# Altium integrated library ECEN5730Lib_2023_05_DS.IntLib: 125 symbols
Pins are listed as number, name and electrical type; pins without a type are passive.

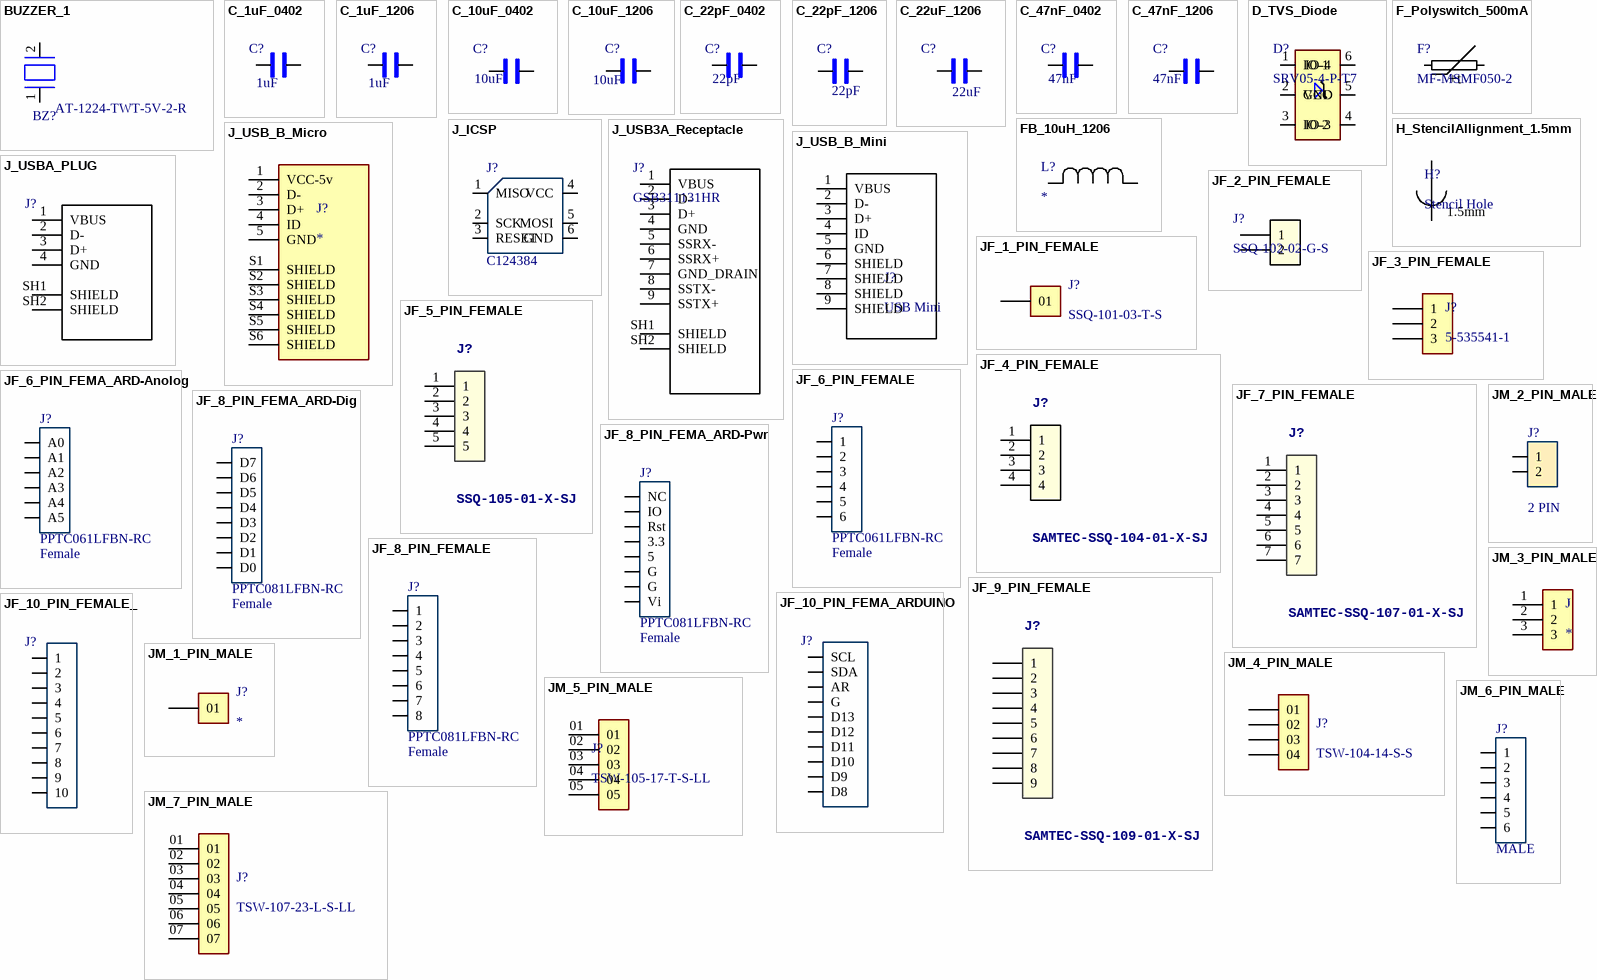
[diagram p0: symbols BUZZER_1 to JM_7_PIN_MALE]

## BUZZER_1
designator BZ?, comment AT-1224-TWT-5V-2-R
Buzzers Transducer, Externally Driven Electromechanical/Magnetic 5 V 40mA 2.4kHz 87dB @ 5V, 10cm Through Hole PC Pins; Datasheet: https://www.puiaudio.com/media/SpecSheet/AT-1224-TWT-5V-2-R.pdf; MFR Part #: AT-1224-TWT-5V-2-R
footprint BUZZER- TH
pins: 1 BZ1, 2 BZ2

## C_1uF_0402
designator C?, comment 1uF
MULTILAYER CERAMIC CAPACITORS MLCC - SMD/SMT 1UF 25V 0402 ROHS; MFR Part #: CL05A105KA5NQNC; Type: Basic; Datasheet: https://datasheet.lcsc.com/szlcsc/Samsung-Electro-Mechanics-CL05A105KA5NQNC_C52923.pdf; LCSC Part#: C52923; Value: 1uF
footprint 0402_Passive_Capacitor (Reference: https://www.worthingtonassembly.com/perfect-0402-footprint)
pins: 1, 2

## C_1uF_1206
designator C?, comment 1uF
MULTILAYER CERAMIC CAPACITORS MLCC - SMD/SMT 1UF 50V 1206 ROHS; MFR Part #: CL31B105KBHNNNE; Type: Basic; Digikey Link: https://www.digikey.com/product-detail/en/C1206C105M4RACTU/399-8150-1-ND/3471873/?itemSeq=304982366; LCSC Part#: C1848; Value: 1uF
footprint 1206_Passive_Capacitor
pins: 1, 2

## C_10uF_0402
designator C?, comment 10uF
10uF ±20% 6.3V X5R 0402 Multilayer Ceramic Capacitors MLCC - SMD/SMT RoHS; MFR Part #: CL05A106MQ5NUNC; Type: Basic; LCSC Part#: C15525; Datasheet: https://datasheet.lcsc.com/lcsc/1810191215_Samsung-Electro-Mechanics-CL05A106MQ5NUNC_C15525.pdf; Value: 10uF
footprint 0402_Passive_Capacitor (Reference: https://www.worthingtonassembly.com/perfect-0402-footprint)
pins: 1, 2

## C_10uF_1206
designator C?, comment 10uF
10uF ±10% 50V X5R 1206 Multilayer Ceramic Capacitors MLCC - SMD/SMT RoHS; MFR Part #: CL31A106KBHNNNE; Type: Basic; LCSC Part#: C13585; Datasheet: https://datasheet.lcsc.com/lcsc/1810221112_Samsung-Electro-Mechanics-CL31A106KBHNNNE_C13585.pdf; Value: 10uF
footprint 1206_Passive_Capacitor
pins: 1, 2

## C_22pF_0402
designator C?, comment 22pF
MULTILAYER CERAMIC CAPACITORS MLCC - SMD/SMT 22PF 50V 0402 ROHS; MFR Part #: 0402CG220J500NT; Type: Basic; Datasheet: https://datasheet.lcsc.com/szlcsc/Guangdong-Fenghua-Advanced-Tech-0402CG220J500NT_C1555.pdf; LCSC Part#: C1555; Value: 22pF
footprint 0402_Passive_Capacitor (Reference: https://www.worthingtonassembly.com/perfect-0402-footprint)
pins: 1, 2

## C_22pF_1206
designator C?, comment 22pF
22pF ±5% 1kV C0G 1206 Multilayer Ceramic Capacitors MLCC - SMD/SMT RoHS; MFR Part #: CC1206JKNPOCBN220; Type: Extended; LCSC Part#: C107174; Datasheet: https://datasheet.lcsc.com/lcsc/1810241219_YAGEO-CC1206JKNPOCBN220_C107174.pdf; Value: 22pF
footprint 1206_Passive_Capacitor
pins: 1, 2

## C_22uF_1206
designator C?, comment 22uF
22uF ±10% 25V X5R 1206 Multilayer Ceramic Capacitors MLCC - SMD/SMT RoHS; MFR Part #: CL31A226KAHNNNE; Type: basic; LCSC Part#: C12891; Datasheet: https://datasheet.lcsc.com/lcsc/1811031514_Samsung-Electro-Mechanics-CL31A226KAHNNNE_C12891.pdf; Value: 22uF
footprint 1206_Passive_Capacitor
pins: 1, 2

## C_47nF_0402
designator C?, comment value 47nF  (hidden comment: 22nF)
50V 47nF X5R ±10% 0402  Multilayer Ceramic Capacitors MLCC - SMD/SMT ROHS; MFR Part #: CC0402KRX5R9BB473; Type: Ext; Datasheet: https://datasheet.lcsc.com/lcsc/2003312232_YAGEO-CC0402KRX5R9BB473_C505502.pdf; LCSC Part#: C505502
footprint 0402_Passive_Capacitor (Reference: https://www.worthingtonassembly.com/perfect-0402-footprint)
pins: 1, 2

## C_47nF_1206
designator C?, comment 47nF
47nF ±5% 50V C0G 1206 Multilayer Ceramic Capacitors MLCC - SMD/SMT RoHS; MFR Part #: GRM31M5C1H473JA01L; Type: Extended; LCSC Part#: C21812; Datasheet: https://datasheet.lcsc.com/lcsc/1810201313_Murata-Electronics-GRM31M5C1H473JA01L_C21812.pdf; Value: 47nF
footprint 1206_Passive_Capacitor
pins: 1, 2

## D_TVS_Diode
designator D?, comment SRV05-4-P-T7
TVS SOT-23-6 ROHS; Value: TVS DIODE 5.5V 6TSOP; Type: Basic; MFR Part #: SRV05-4-P-T7; LCSC Part#: C85364; Datasheet: https://datasheet.lcsc.com/szlcsc/ProTek-Devices-SRV05-4-P-T7_C85364.pdf
footprint TVS
pins: 1 IO-1, 2 GND, 3 IO-2, 4 IO-3, 5 VCC, 6 IO-4

## F_Polyswitch_500mA
designator F?, comment MF-MSMF050-2
Polymeric PTC Resettable Fuse 15V 500mA Ih Surface Mount 1812 (4532 Metric), Concave; Value: PTC RESET FUSE 15V 500MA 1812; Type: Extended; Digikey Link: https://www.digikey.com/product-detail/en/MF-MSMF050-2/MF-MSMF050-2CT-ND/662842/?itemSeq=304982360; MFR Part #: MF-MSMF050-2; LCSC Part#: C13575
footprint FUSE
pins: 1, 2
text: +t

## FB_10uH_1206
designator L?
25mA 10uH ±10% 800mΩ 1206  Inductors (SMD) ROHS; Mfr_Name: FH (Guangdong Fenghua Advanced Tech); MFR PART #: CMI321609X100KT; Type: Basic; LCSC PART#: C1051; DataSheet: https://datasheet.lcsc.com/lcsc/1810311314_FH--Guangdong-Fenghua-Advanced-Tech-CMI321609X100KT_C1051.pdf
footprint AIML-1206_ABR-M
pins: 1, 2

## H_StencilAllignment_1.5mm
designator H?, comment Stencil Hole
Stencil Allignment hole for use with 1.5mm pin
footprint AlignmentHole_1.5mm
text: 1.5mm

## J_ICSP
designator J?, comment LCSC Part#: C124384  (hidden comment: NRPN032PAEN-RC)
Connector Header Through Hole 6 position 0.079" (2.00mm); Digikey Link: https://www.digikey.com/product-detail/en/NRPN032PAEN-RC/S5801-03-ND/804955/?itemSeq=304982355; MFR Part #: NRPN032PAEN-RC; Type: Extended
footprint ICSP
pins: 1 MISO, 2 SCK, 3 RESET, 4 VCC, 5 MOSI, 6 GND

## J_USB3A_Receptacle
designator J?, comment GSB311131HR
USB-A _USB TYPE-A_ USB 3.0 _USB 3.1 Gen 1, Superspeed_ Receptacle Connector 9 Position Through Hole, Right Angle; MFR Part #: GSB311131HR; DigiKey Link: https://www.digikey.com/en/products/detail/amphenol-icc-commercial-products/GSB311131HR/2187173?utm_source=snapeda&utm_medium=aggregator&utm_campaign=symbol; Datasheet: https://datasheet.lcsc.com/szlcsc/1811131822_Jing-Extension-of-the-Electronic-Co-901-112A105AD10100_C69073.pdf; LCSC Part#: C69073
footprint USB_3A_Receptacle
pins: 1 VBUS, 2 D-, 3 D+, 4 GND, 5 SSRX-, 6 SSRX+, 7 GND_DRAIN, 8 SSTX-, 9 SSTX+, SH1 SHIELD, SH2 SHIELD

## J_USB_B_Micro
designator J?
Micro Usb, 2.0 Type b, Rcpt, Smt; MFR: Amphenol ICC; MFR Part #: 10118194-0001LF; Digikey link: https://www.digikey.com/en/products/detail/amphenol-cs-fci/10118194-0001LF/2785389?s=N4IgTCBcDaIAQEYAMCEA4EE4AsBaJBCAMgGJwgC6AvkA; DataSheet: https://www.amphenol-cs.com/media/wysiwyg/files/drawing/10118194.pdf; LCSC Part#: C132563; Type: Extended
footprint AMPHENOL_10118194-0001LF
pins: 1 VCC-5v (power), 2 D-, 3 D+, 4 ID, 5 GND, S1 SHIELD, S2 SHIELD, S3 SHIELD, S4 SHIELD, S5 SHIELD, S6 SHIELD

## J_USB_B_Mini
designator J?, comment USB Mini
Through Hole USB Connectors RoHS; MFR Part #: 920-462A2021D10102; Value: USB mini B; LCSC Part#: C46398; Datasheet: https://datasheet.lcsc.com/szlcsc/2103081233_Jing-Extension-of-the-Electronic-Co-920-462A2021D10102_C46398.pdf; Type: Extended
footprint USB_MINI_B
pins: 1 VBUS, 2 D-, 3 D+, 4 ID, 5 GND, 6 SHIELD, 7 SHIELD, 8 SHIELD, 9 SHIELD

## J_USBA_PLUG
designator J?, comment USB - Type A Male  (value not drawn)
USB - Type A Male USB 2.0 4 18.7*12(mm) USB Connectors RoHS; MFR Part #: U217-041N-4BV81; LCSC Part#: C319178; Datasheet: https://datasheet.lcsc.com/lcsc/2110151630_XKB-Connectivity-U217-041N-4BV81_C319178.pdf; Type: Extended
footprint USB_A_plug - 4BV81
pins: 1 VBUS, 2 D-, 3 D+, 4 GND, SH1 SHIELD, SH2 SHIELD

## JF_1_PIN_FEMALE
designator J?, comment SSQ-101-03-T-S
SSQ Series .100 Tiger Buyâ„¢ Socket Strip, Square Tail; MFR PART #: X6511FV-01-C85D32; MP: SSQ-101-03-T-S; LCSC PART#: C2883837
footprint JF-1_SSQ-101-03-T-S
pins: 01

## JF_2_PIN_FEMALE
designator J?, comment SSQ-102-02-G-S
2.54mm Straight 1x2P 2 1 Straight,P=2.54mm  Female Headers ROHSon Available; MFR PART #: C49661; MFR PN: SSQ-102-02-G-S; LCSC PART#: C49661
footprint JF-2_1X2_TU_SSQ
pins: 1, 2

## JF_3_PIN_FEMALE
designator J?, comment 5-535541-1
Conn Socket Strip RCP 3 POS 2.54mm Solder ST Thru-Hole; MFR PART #: PM2.54-1*3; MP: 5-535541-1; LCSC PART#: C5116529
footprint JF_TE_5-535541-1
pins: 1, 2, 3

## JF_4_PIN_FEMALE
designator J?, comment SAMTEC-SSQ-104-01-X-SJ
2.54mm 3A bronze -40℃~+105℃ Straight 1x4P Top 4 1 Square Holes Straight,P=2.54mm  Female Headers ROHS; MFR PART #: SSQ-104-01-X-SJ; LCSC PART#: C2718488
footprint JF-4_SSQ-104-01-X-S
pins: 1, 2, 3, 4

## JF_5_PIN_FEMALE
designator J?, comment SSQ-105-01-X-SJ
2.54mm Straight 1x5P 5 1 Straight,P=2.54mm  Female Headers ROHS; MFR PART #: SSQ-105-01-X-SJ; LCSC PART#: C50950; DataSheet: https://datasheet.lcsc.com/lcsc/1811092140_BOOMELE-Boom-Precision-Elec-C50950_C50950.pdf
footprint JF-5_SSQ-105-01-X-S
pins: 1, 2, 3, 4, 5

## JF_6_PIN_FEMA_ARD-Anolog
designator J?, comment PPTC061LFBN-RC  value Female
6 Position Header Connector 0.100" (2.54mm) Through Hole Tin; Digikey Link: https://www.digikey.com/product-detail/en/PPTC061LFBN-RC/S7004-ND/810145/?itemSeq=304982353; MFR Part #: PPTC061LFBN-RC; LCSC Part#: C40877; Type: Extended
footprint 6_PIN_ARD-Analog_100mil
pins: 1 A0, 2 A1, 3 A2, 4 A3, 5 A4, 6 A5

## JF_6_PIN_FEMALE
designator J?, comment PPTC061LFBN-RC  value Female
6 Position Header Connector 0.100" (2.54mm) Through Hole Tin; Digikey Link: https://www.digikey.com/product-detail/en/PPTC061LFBN-RC/S7004-ND/810145/?itemSeq=304982353; MFR Part #: PPTC061LFBN-RC; LCSC Part#: C40877; Type: Extended
footprint 6_PIN_100MIL -Female
pins: 1, 2, 3, 4, 5, 6

## JF_7_PIN_FEMALE
designator J?, comment SAMTEC-SSQ-107-01-X-SJ
2.54mm Brass Straight 1x7P 7 1 Straight,P=2.54mm  Female Headers ROHS; MFR PART #: B-2200S07P-A120; MP: SAMTEC-SSQ-107-01-X-SJ; LCSC PART#: C124418
footprint JF-7_SSQ-107-01-X-S
pins: 1, 2, 3, 4, 5, 6, 7

## JF_8_PIN_FEMA_ARD-Dig
designator J?, comment PPTC081LFBN-RC  value Female
8 Position Header Connector 0.100" (2.54mm) Through Hole Tin; Digikey Link: https://www.digikey.com/product-detail/en/PPTC081LFBN-RC/S7006-ND/810147/?itemSeq=304982354; MFR Part #: PPTC081LFBN-RC; Type: Extended; LCSC Part#: C27438
footprint 8_PIN_ARD-DIG_100MIL
pins: 1 D7, 2 D6, 3 D5, 4 D4, 5 D3, 6 D2, 7 D1, 8 D0

## JF_8_PIN_FEMA_ARD-Pwr
designator J?, comment PPTC081LFBN-RC  value Female
8 Position Header Connector 0.100" (2.54mm) Through Hole Tin; Digikey Link: https://www.digikey.com/product-detail/en/PPTC081LFBN-RC/S7006-ND/810147/?itemSeq=304982354; MFR Part #: PPTC081LFBN-RC; Type: Extended; LCSC Part#: C27438
footprint 8_PIN_ARD-PWR_100MIL
pins: 1 NC, 2 IO, 3 Rst, 4 3.3, 5, 6 G, 7 G, 8 Vi

## JF_8_PIN_FEMALE
designator J?, comment PPTC081LFBN-RC  value Female
8 Position Header Connector 0.100" (2.54mm) Through Hole Tin; Digikey Link: https://www.digikey.com/product-detail/en/PPTC081LFBN-RC/S7006-ND/810147/?itemSeq=304982354; MFR Part #: PPTC081LFBN-RC; Type: Extended; LCSC Part#: C27438
footprint 8_PIN_100MIL - Female
pins: 1, 2, 3, 4, 5, 6, 7, 8

## JF_9_PIN_FEMALE
designator J?, comment SAMTEC-SSQ-109-01-X-SJ
2.54mm, Straight 1x9P 8.5mm Top 9 1 Square Holes, P=2.54mm  Female Headers; MFR PART #: PM254-1-09-Z-8.5; MF PN: SSQ-109-01-X-SJ; LCSC PART#: C2897372
footprint JF-9_SSQ-109-01-X-S
pins: 1, 2, 3, 4, 5, 6, 7, 8, 9

## JF_10_PIN_FEMA_ARDUINO
designator J?, comment PPTC101LFBN-RC  (value not drawn)
10 Position Header Connector 0.100" (2.54mm) Through Hole Tin; Value: Female; Digikey Link: https://www.digikey.com/product-detail/en/PPTC101LFBN-RC/S7008-ND/810149/?itemSeq=304982352; MFR Part #: PPTC101LFBN-RC; LCSC Part#: C225507; Type: Extended
footprint 10_PIN_ARDUINO_100MIL
pins: 1 SCL, 2 SDA, 3 AR, 4 G, 5 D13, 6 D12, 7 D11, 8 D10, 9 D9, 10 D8

## JF_10_PIN_FEMALE_
designator J?, comment PPTC101LFBN-RC  (value not drawn)
10 Position Header Connector 0.100" (2.54mm) Through Hole Tin; Value: Female; Digikey Link: https://www.digikey.com/product-detail/en/PPTC101LFBN-RC/S7008-ND/810149/?itemSeq=304982352; MFR Part #: PPTC101LFBN-RC; LCSC Part#: C225507; Type: Extended
footprint 10_PIN_100MIL - Female
pins: 1, 2, 3, 4, 5, 6, 7, 8, 9, 10

## JM_1_PIN_MALE
designator J?
SSQ Series .100 Tiger Buyâ„¢ Socket Strip, Square Tail; MFR PART #: PZ254V-11-01P; LCSC PART#: C492400
footprint JM-1_SSQ-101-03-T-S
pins: 01

## JM_2_PIN_MALE
designator J?, comment 2 PIN
2.54mm Straight 2 1 Header，Breakaway Through Hole,P=2.54mm Pin Header & Female Header ROHS; MFR Part #: B-2100S02P-A110; Type: Extended; Datasheet: https://datasheet.lcsc.com/lcsc/1811151421_Ckmtw-Shenzhen-Cankemeng-B-2100S02P-A110_C124375.pdf; LCSC Part#: C124375; Value: 2 PIN
footprint 2_PIN_100MIL
pins: 1, 2

## JM_3_PIN_MALE
designator J
Header; Conn; Interconnect System; PCB Plug; 3 Cont; Thru-Hole; Breakaway; Straight; 3A; MP: 5-146281-3; MFR PART #: *; LCSC PART#: C49257
footprint JM-3_TE_5-146281-3
pins: 1, 2, 3

## JM_4_PIN_MALE
designator J?, comment TSW-104-14-S-S
Square Pins 2.5mm 6mm -40℃~+105℃ 1 4 3mm 2.54mm Black 1x4P Straight,P=2.54mm  Pin Headers ROHS; MFR PART #: PZ254V-11-04P; MP: TSW-104-14-S-S; LCSC PART#: C2691448
footprint JM-4_TSW-104-14-S-S
pins: 01, 02, 03, 04

## JM_5_PIN_MALE
designator J?, comment TSW-105-17-T-S-LL
Straight Square Pins 2mm 3.9mm -40℃~+105℃ 1 2.8mm 5 2mm Black Brass 1x5P Straight,P=2mm  Pin Headers ROHS; MFR PART #: PZ254V-11-05P; MP: TSW-105-17-T-S-LL; LCSC PART#: C492404
footprint JM-5_TSW-105-17-T-S-LL
pins: 01, 02, 03, 04, 05

## JM_6_PIN_MALE
designator J?, comment MALE
Male header- 6 pin 1 row- through Hole; LCSC Part#: C37208; Datasheet: https://datasheet.lcsc.com/szlcsc/1810312320_BOOMELE-Boom-Precision-Elec-C37208_C37208.pdf; Type: Extended; Value: MALE
footprint 6_PIN_100MIL-Male
pins: 1, 2, 3, 4, 5, 6

## JM_7_PIN_MALE
designator J?, comment TSW-107-23-L-S-LL
Straight Square Pins 2.5mm 6mm -40℃~+105℃ 1 3mm 7 2.54mm Black Brass 1x7P Straight,P=2.54mm  Pin Headers ROHS; MFR PART #: PZ254V-11-07P; MP: TSW-107-23-L-S-LL; LCSC PART#: C492406
footprint JM-7_TSW-107-23-L-S-LL
pins: 01, 02, 03, 04, 05, 06, 07

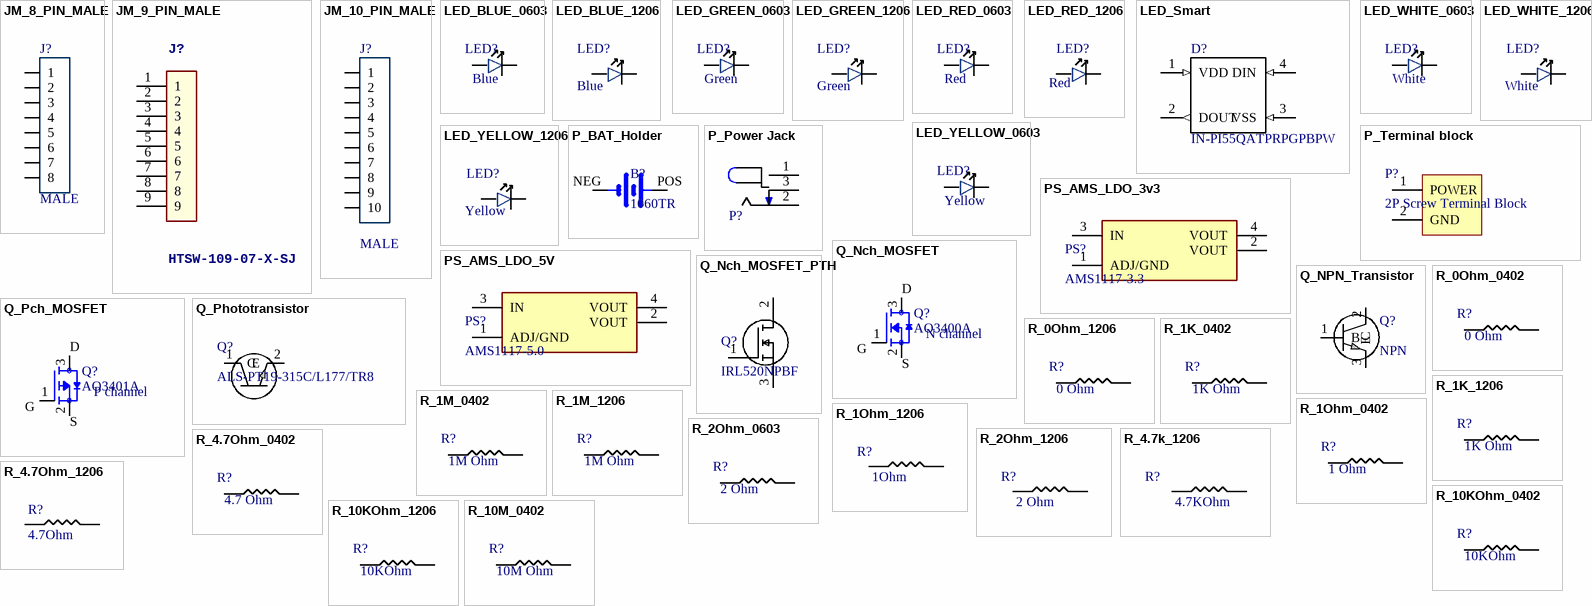
[diagram p1: symbols JM_8_PIN_MALE to R_10M_0402]

## JM_8_PIN_MALE
designator J?, comment value MALE  (hidden comment: MALE 8PIN)
Pin Header 8 1 right-angle，180degrees 2.54mm Through Hole,P=2.54mm Pin Header & Female Header RoHS; LCSC Part#: C492407; Datasheet: https://datasheet.lcsc.com/szlcsc/2003191006_XFCN-PZ254V-11-08P_C492407.pdf; Type: Extended
footprint 8_PIN_100MIL-Male
pins: 1, 2, 3, 4, 5, 6, 7, 8

## JM_9_PIN_MALE
designator J?, comment HTSW-109-07-X-SJ
2.54mm Black 1x9P Straight,P=2.54mm Pin Headers; MFR PART #: PZ254-1-09-Z-8.5; MFR PN: HTSW-109-07-X-SJ; LCSC PART#: C2894932
footprint JM-9_HTSW-109-07-X-S
pins: 1, 2, 3, 4, 5, 6, 7, 8, 9

## JM_10_PIN_MALE
designator J?, comment value MALE  (hidden comment: MALE 10PIN)
Pin Header 10 1 Straight ，180degrees 2.54mm Through Hole,P=2.54mm Pin Header & Female Header RoHS; LCSC Part#: C124372; Type: Extended; Datasheet: https://datasheet.lcsc.com/szlcsc/1810241611_Ckmtw-Shenzhen-Cankemeng-C124372_C124372.pdf
footprint 10_PIN_100MIL-Male
pins: 1, 2, 3, 4, 5, 6, 7, 8, 9, 10

## LED_BLUE_0603
designator LED?, comment value Blue  (hidden comment: 0603Bl)
LIGHT EMITTING DIODES (LED) BLUE 465~475NM 11.5~28.5MCD@5MA TOP VIEW 0603 ROHS; MFR Part #: 19-217/BHC-ZL1M2RY/3T; Type: Basic; LCSC Part#: C72041
footprint LED_0603
pins: 1, 2

## LED_BLUE_1206
designator LED?, comment Blue
blue 1206  Light Emitting Diodes (LED) ROHS; MFR Part #: NCD1206B1; Type: Extended; LCSC Part#: C130717; Datasheet: https://datasheet.lcsc.com/lcsc/2008201033_Foshan-NationStar-Optoelectronics-NCD1206B1_C130717.pdf; Value: Blue
footprint LED_1206
pins: 1, 2

## LED_GREEN_0603
designator LED?, comment value Green  (hidden comment: 0603Gr)
LIGHT EMITTING DIODES (LED) GREEN 520~535NM 112~258MCD@20MA TOP VIEW 0603 ROHS; MFR Part #: 19-217/GHC-YR1S2/3T; Type: Basic; LCSC Part#: C72043
footprint LED_0603
pins: 1, 2

## LED_GREEN_1206
designator LED?, comment Green
Green 513~528nm 1206 Light Emitting Diodes (LED) RoHS; MFR Part #: SZYY1206G; Type: Extended; LCSC Part#: C434439; Datasheet: https://datasheet.lcsc.com/lcsc/2006301532_Yongyu-Photoelectric-SZYY1206G_C434439.pdf; Value: Green
footprint LED_1206
pins: 1, 2

## LED_RED_0603
designator LED?, comment value Red  (hidden comment: 0603R)
LIGHT EMITTING DIODES (LED) RED 520~625NM 90~100MCD@20MA TOP VIEW 0603 ROHS; MFR Part #: KT-0603R; Type: Basic; Datasheet: https://datasheet.lcsc.com/szlcsc/Everlight-Elec-19-217-BHC-ZL1M2RY-3T_C72041.pdf; LCSC Part#: C2286
footprint LED_0603
pins: 1, 2

## LED_RED_1206
designator LED?, comment Red
Red 621~631nm 1206 Light Emitting Diodes (LED) RoHS; MFR Part #: 15-21/R6C-FQ1R1B/2T; Type: Extended; LCSC Part#: C93133; Datasheet: https://datasheet.lcsc.com/szlcsc/1811151241_Everlight-Elec-15-21-R6C-FQ1R1B-2T_C93133.pdf; Value: Red
footprint LED_1206
pins: 1, 2

## LED_Smart
designator D?, comment IN-PI55QATPRPGPBPW
LIGHT EMITTING DIODES (LED) RGB 620~630NM RED, 520~530NM GREEN, 465~475NM BLUE 600MCD@16MARED,1200MCD@16MAGREEN,300MCD@16MABLUE TOP VIEW SMD-4 ROHS; MFR Part #: XL-5050RGBC-WS2812B; Manufacturer: XINGLIGHT; LCSC Part#: C2843785; DataSheet: https://datasheet.lcsc.com/lcsc/2301111130_XINGLIGHT-XL-5050RGBC-WS2812B_C2843785.pdf
footprint SERIAL_LED - duplicate (Footprint for serial LED)
pins: 1 VDD (in), 2 DOUT (out) "Dout", 3 VSS (in), 4 DIN (in) "Din"

## LED_WHITE_0603
designator LED?, comment value White  (hidden comment: KT-0603R)
LIGHT EMITTING DIODES (LED) WHITE 173~207MCD@20MA TOP VIEW 0603 ROHS; Type: Basic; MFR Part #: -; LCSC Part#: C2290
footprint LED_0603
pins: 1, 2

## LED_WHITE_1206
designator LED?, comment White
White light 1206  Light Emitting Diodes (LED) ROHS; MFR Part #: NCD1206W1; Type: Extended; LCSC Part#: C130718; Datasheet: https://datasheet.lcsc.com/lcsc/2008201033_Foshan-NationStar-Optoelectronics-NCD1206W1_C130718.pdf; Value: White
footprint LED_1206
pins: 1, 2

## LED_YELLOW_0603
designator LED?, comment value Yellow  (hidden comment: 0603YLW)
LIGHT EMITTING DIODES (LED) YELLOW 585.5~591.5NM 90~180MCD@20MA TOP VIEW 0603 ROHS; MFR Part #: 19-213/Y2C-CQ2R2L/3T(CY); Type: Basic; Datasheet: https://datasheet.lcsc.com/szlcsc/Everlight-Elec-19-217-BHC-ZL1M2RY-3T_C72041.pdf; LCSC Part#: C72038
footprint LED_0603
pins: 1, 2

## LED_YELLOW_1206
designator LED?, comment Yellow
yellow 1206  Light Emitting Diodes (LED) ROHS; MFR Part #: NCD1206Y1; Type: Extended; LCSC Part#: C93094; Datasheet: https://datasheet.lcsc.com/lcsc/2008201033_Foshan-NationStar-Optoelectronics-NCD1206Y1_C93094.pdf; Value: Yellow
footprint LED_1206
pins: 1, 2

## P_BAT_Holder
designator B?, comment 1060TR
Battery Holder CR2032 SMD  Battery Connectors ROHS; MFR: Keystone; DataSheet: https://datasheet.lcsc.com/lcsc/1808061222_Keystone-1060TR_C238069.pdf; MFR Part #: 1060TR; LCSC Part#: C238069; Type: Extended; Amazon-sub-link: https://www.amazon.com/Tegg-Horizontal-Battery-Container-Arduino/dp/B07SK7G4ZB
footprint BAT_1060TR
pins: NEG (power), POS (power)

## P_Power Jack
designator P?, comment Power Jack  (value not drawn)
Power Barrel Connector Jack 2.10mm ID (0.083"), 5.50mm OD (0.217") Through Hole, Right Angle; MFR Part #: PJ-102A; Value: CONN PWR JACK 2X5.5MM SOLDER; Digikey Link: https://www.digikey.com/product-detail/en/PJ-102A/CP-102A-ND/275425/?itemSeq=304982367; LCSC Part#: C136744; Type: Extended
footprint Power_Jack
pins: 1 (power), 2 (power), 3 (power)

## P_Terminal block
designator P?, comment 2P Screw Terminal Block
Green Straight pin 3.5mm  pitch; P=3.5mm  Screw terminal ROHS; MFR Part #: KF350-3.5-2P; Manufacturer: Cixi Kefa Elec; LCSC Part#: C474892; DataSheet: https://datasheet.lcsc.com/lcsc/2001160007_Cixi-Kefa-Elec-KF350-3-5-2P_C474892.pdf
footprint P_Terminal block 3.5mm-pitch
pins: 1 POWER, 2 GND

## PS_AMS_LDO_3v3
designator PS?, comment AMS1117-3.3
LOW DROPOUT REGULATORS(LDO) POSITIVE FIXED 1.3V @ 800MA 15V 3.3V 1A SOT-223 ROHS; Value: IC REG LINEAR 3.3V 800MA SOT223; MFR Part #: AMS1117-3.3; LCSC Part#: C6186; Type: Basic
footprint LDO
pins: 1 ADJ/GND, 2 VOUT (power), 3 IN (power), 4 VOUT (power)

## PS_AMS_LDO_5V
designator PS?, comment AMS1117-5.0
LOW DROPOUT REGULATORS(LDO) POSITIVE FIXED 1.3V @ 1A 15V 5V 1A SOT-223 ROHS; Value: IC REG LINEAR 5V 1A SOT223; MFR Part #: AMS1117-5.0; LCSC Part#: C6187; Type: Basic
footprint LDO
pins: 1 ADJ/GND, 2 VOUT (power), 3 IN (power), 4 VOUT (power)

## Q_Nch_MOSFET
designator Q?, comment AO3400A  value N channel
MOSFET N Trench 30V 5.7A 1.5V @ 250uA 26.5 m? @ 5.7A,10V SOT-23-3L RoHS; Type: Basic; LCSC Part#: C20917; Datasheet: https://datasheet.lcsc.com/szlcsc/Alpha-Omega-Semicon-AOS-AO3400A_C20917.pdf; MFR Part #: AO3400A
footprint N-MOSFET
pins: 1 G, 2 S, 3 D

## Q_Nch_MOSFET_PTH
designator Q?, comment IRL520NPBF
MOSFET (N-Channel)  IRL520NPBF; Manufacturer_Name: Infineon; Datasheet Link: https://www.infineon.com/dgdl/irl520npbf.pdf?fileId=5546d462533600a40153565f9b62255b; Height: 4.69mm; Manufacturer_Part_Number: IRL520NPBF; Mouser Part Number: 942-IRL520NPBF; Mouser Price/Stock: https://www.mouser.co.uk/ProductDetail/Infineon-IR/IRL520NPBF?qs=9%252BKlkBgLFf3eZ5ppEpIaKQ%3D%3D; Arrow Part Number: IRL520NPBF; Arrow Price/Stock: https://www.arrow.com/en/products/irl520npbf/infineon-technologies-ag?region=nac
footprint TO254P469X1042X1967-3P
pins: 1 G, 2 D, 3 S

## Q_NPN_Transistor
designator Q?, comment NPN
NPN 3A 30V 500mW SOT-89(SOT-89-3) Transistors (NPN/PNP) RoHS; Type: Basic; Datasheet: https://datasheet.lcsc.com/lcsc/1809192311_Changjiang-Electronics-Tech-CJ-C9634_C9634.pdf; LCSC Part#: C9634; Value: NPN
footprint Q_SOT89-3
pins: 1 B, 2 C, 3 E

## Q_Pch_MOSFET
designator Q?, comment AO3401A  value P channel
MOSFET P Trench 30V 4A 1.3V @ 250uA 44 m? @ 4.3A,10V SOT-23-3L RoHS; Type: Basic; LCSC Part#: C15127; Datasheet: https://datasheet.lcsc.com/lcsc/1810171817_Alpha---Omega-Semicon-AO3401A_C15127.pdf; MFR Part #: AO3401A
footprint P-MOSFET (Footprint not found)
pins: 1 G, 2 S, 3 D

## Q_Phototransistor
designator Q?, comment ALS-PT19-315C/L177/TR8
Ambient Light Sensor; Type: Extended; Datasheet: https://www.everlight.com/file/ProductFile/201407061531031645.pdf; MFR Part #: ALS-PT19-315C/L177/TR8; LCSC Part#: C146233
footprint LED_77/TR8_EVE
pins: 1 C, 2 E

## R_0Ohm_0402
designator R?, comment 0 Ohm
CHIP RESISTOR - SURFACE MOUNT 0OHMS ±1% 1/16W 0402 ROHS; MFR Part #: 0402WGF0000TCE; Datasheet: https://datasheet.lcsc.com/szlcsc/Uniroyal-Elec-0402WGF0000TCE_C17168.pdf; LCSC Part#: C17168; Type: Basic; Value: 0 Ohm
footprint 0402_Passive_Resistor (Reference: https://www.worthingtonassembly.com/perfect-0402-footprint)
pins: 1, 2

## R_0Ohm_1206
designator R?, comment 0 Ohm
CHIP RESISTOR - SURFACE MOUNT 0OHMS ±1% 1/4W 1206 ROHS; MFR Part #: 1206W4F0000T5E; Datasheet: https://datasheet.lcsc.com/szlcsc/Uniroyal-Elec-1206W4F0000T5E_C17888.pdf; LCSC Part#: C17888; Type: Basic; Mouser link: https://www.mouser.com/ProductDetail/Royalohm/1206W4F0000T5E?qs=e8oIoAS2J1Thbopin%252BsagQ%3D%3D; Value: 0 Ohm
footprint 1206_Passive_Resitor
pins: 1, 2

## R_1K_0402
designator R?, comment value 1K Ohm  (hidden comment: 1k)
1 kOhms chip resistor SURFACE MOUNT 1KOHMS ±1% 1/16W 0402 ROHS; MFR Part #: 0402WGF1001TCE; Datasheet: https://datasheet.lcsc.com/szlcsc/Uniroyal-Elec-0402WGF1001TCE_C11702.pdf; LCSC Part#: C11702; Type: Basic
footprint 0402_Passive_Resistor (Reference: https://www.worthingtonassembly.com/perfect-0402-footprint)
pins: 1, 2

## R_1K_1206
designator R?, comment value 1K Ohm  (hidden comment: 1k)
CHIP RESISTOR - SURFACE MOUNT 1KOHMS ±1% 1/4W 1206 ROHS; MFR Part #: RNCP1206FTD1K00CT; Digikey Link: https://www.digikey.com/product-detail/en/RNCP1206FTD1K00/RNCP1206FTD1K00CT-ND/2240675/?itemSeq=304982373; LCSC Part#: C4410; Type: Basic
footprint 1206_Passive_Resitor
pins: 1, 2

## R_1M_0402
designator R?, comment value 1M Ohm  (hidden comment: 1M)
CHIP RESISTOR - SURFACE MOUNT 1MOHMS ±1% 1/16W 0402 ROHS; MFR Part #: 0402WGF1004TCE; Datasheet: https://datasheet.lcsc.com/szlcsc/Uniroyal-Elec-0402WGF1004TCE_C26083.pdf; LCSC Part#: C26083; Type: Basic
footprint 0402_Passive_Resistor (Reference: https://www.worthingtonassembly.com/perfect-0402-footprint)
pins: 1, 2

## R_1M_1206
designator R?, comment value 1M Ohm  (hidden comment: 1M)
CHIP RESISTOR - SURFACE MOUNT 1MOHMS ±1% 1/4W 1206 ROHS; MFR Part #: RMCF1206JT1M00; Digikey Link: https://www.digikey.com/product-detail/en/RMCF1206JT1M00/RMCF1206JT1M00CT-ND/1942830/?itemSeq=304982358; LCSC Part#: C17927; Type: Basic
footprint 1206_Passive_Resitor
pins: 1, 2

## R_1Ohm_0402
designator R?, comment 1 Ohm
CHIP RESISTOR - SURFACE MOUNT 1OHMS ±1% 1/16W 0402 ROHS; MFR Part #: 0402WGF100KTCE; Datasheet: https://datasheet.lcsc.com/szlcsc/Uniroyal-Elec-0402WGF100KTCE_C25086.pdf; LCSC Part#: C25086; Type: Basic; Value: 1 Ohm
footprint 0402_Passive_Resistor (Reference: https://www.worthingtonassembly.com/perfect-0402-footprint)
pins: 1, 2

## R_1Ohm_1206
designator R?, comment value 1Ohm  (hidden comment: 1 Ohm)
1Ω ±5% 0.25W ±400ppm/℃ 1206 Chip Resistor - Surface Mount RoHS; MFR Part #: 1206W4J010JT5E; LCSC Part#: C1409; Datasheet: https://datasheet.lcsc.com/lcsc/1810301410_UNI-ROYAL-Uniroyal-Elec-1206W4J010JT5E_C1409.pdf; Type: Extended
footprint 1206_Passive_Resitor
pins: 1, 2

## R_2Ohm_0603
designator R?, comment 2 Ohm
CHIP RESISTOR - SURFACE MOUNT 2OHMS ±1% 1/10W 0603 ROHS; MFR Part #: 0603WAF200KT5E; Datasheet: https://datasheet.lcsc.com/szlcsc/Uniroyal-Elec-0603WAF200KT5E_C22977.pdf; LCSC Part#: C22977; Type: Basic; Value: 2 Ohm
footprint 0603_PASSIVE_Resistor (Reference: http://livepartlibrary.com/fpdimensions.html)
pins: 1, 2

## R_2Ohm_1206
designator R?, comment value 2 Ohm  (hidden comment: 2Ohm)
2Ω ±1% 0.25W ±400ppm/℃ 1206 Chip Resistor - Surface Mount RoHS; MFR Part #: 1206W4F200KT5E; LCSC Part#: C17942; Datasheet: https://datasheet.lcsc.com/lcsc/1809050635_UNI-ROYAL-Uniroyal-Elec-1206W4F200KT5E_C17942.pdf; Type: Extended
footprint 1206_Passive_Resitor
pins: 1, 2

## R_4.7k_1206
designator R?, comment 4.7KOhm
4.7kΩ ±1% 0.25W ±100ppm/℃ 1206 Chip Resistor - Surface Mount RoHS; MFR Part #: 1206W4F4701T5E; LCSC Part#: C17936; Datasheet: https://datasheet.lcsc.com/lcsc/1810301414_UNI-ROYAL-Uniroyal-Elec-1206W4F4701T5E_C17936.pdf; Type: Basic; Value: 4.7KOhm
footprint 1206_Passive_Resitor
pins: 1, 2

## R_4.7Ohm_0402
designator R?, comment 4.7 Ohm
1/16W Thick Film Resistors 50V ±5% ±200ppm/℃ -55℃~+155℃ 4.7Ω 0402  Chip Resistor - Surface Mount ROHS; MFR Part #: 0402WGJ047JTCE; Datasheet: https://datasheet.lcsc.com/lcsc/2205311845_UNI-ROYAL-Uniroyal-Elec-0402WGJ047JTCE_C25169.pdf; LCSC Part#: C25169; Type: Extended; Value: 4.7 Ohm
footprint 0402_Passive_Resistor (Reference: https://www.worthingtonassembly.com/perfect-0402-footprint)
pins: 1, 2

## R_4.7Ohm_1206
designator R?, comment 4.7Ohm
4.7Ω ±5% 0.25W ±400ppm/℃ 1206 Chip Resistor - Surface Mount RoHS; MFR Part #: 1206W4F470KT5E; LCSC Part#: C17937; Datasheet: https://datasheet.lcsc.com/lcsc/2206010145_UNI-ROYAL-Uniroyal-Elec-1206W4F470KT5E_C17937.pdf; Type: Extended; Value: 4.7Ohm
footprint 1206_Passive_Resitor
pins: 1, 2

## R_10KOhm_0402
designator R?, comment value 10KOhm  (hidden comment: 10k)
CHIP RESISTOR - SURFACE MOUNT 10KOHMS ±1% 1/16W 0402 ROHS; MFR Part #: 0402WGF1002TCE; Datasheet: https://datasheet.lcsc.com/szlcsc/Uniroyal-Elec-0402WGF1002TCE_C25744.pdf; LCSC Part#: C25744; Type: Basic
footprint 0402_Passive_Resistor (Reference: https://www.worthingtonassembly.com/perfect-0402-footprint)
pins: 1, 2

## R_10KOhm_1206
designator R?, comment value 10KOhm  (hidden comment: 10k)
10 kOhms ±5% 0.25W, 1/4W Chip Resistor 1206 (3216 Metric) Automotive AEC-Q200 Thick Film; MFR Part #: RMCF1206FT10K0; Digikey Link: https://www.digikey.com/en/products/detail/stackpole-electronics-inc/RMCF1206FT10K0/1759669; LCSC Part#: C17902; Type: Basic
footprint 1206_Passive_Resitor
pins: 1, 2

## R_10M_0402
designator R?, comment value 10M Ohm  (hidden comment: 10M)
CHIP RESISTOR - SURFACE MOUNT 10MOHMS ±1% 1/16W 0402 ROHS; MFR Part #: 0402WGF1005TCE; Datasheet: https://datasheet.lcsc.com/lcsc/2206010030_UNI-ROYAL-Uniroyal-Elec-0402WGF1005TCE_C26082.pdf; LCSC Part#: C26082; Type: Basic
footprint 0402_Passive_Resistor (Reference: https://www.worthingtonassembly.com/perfect-0402-footprint)
pins: 1, 2

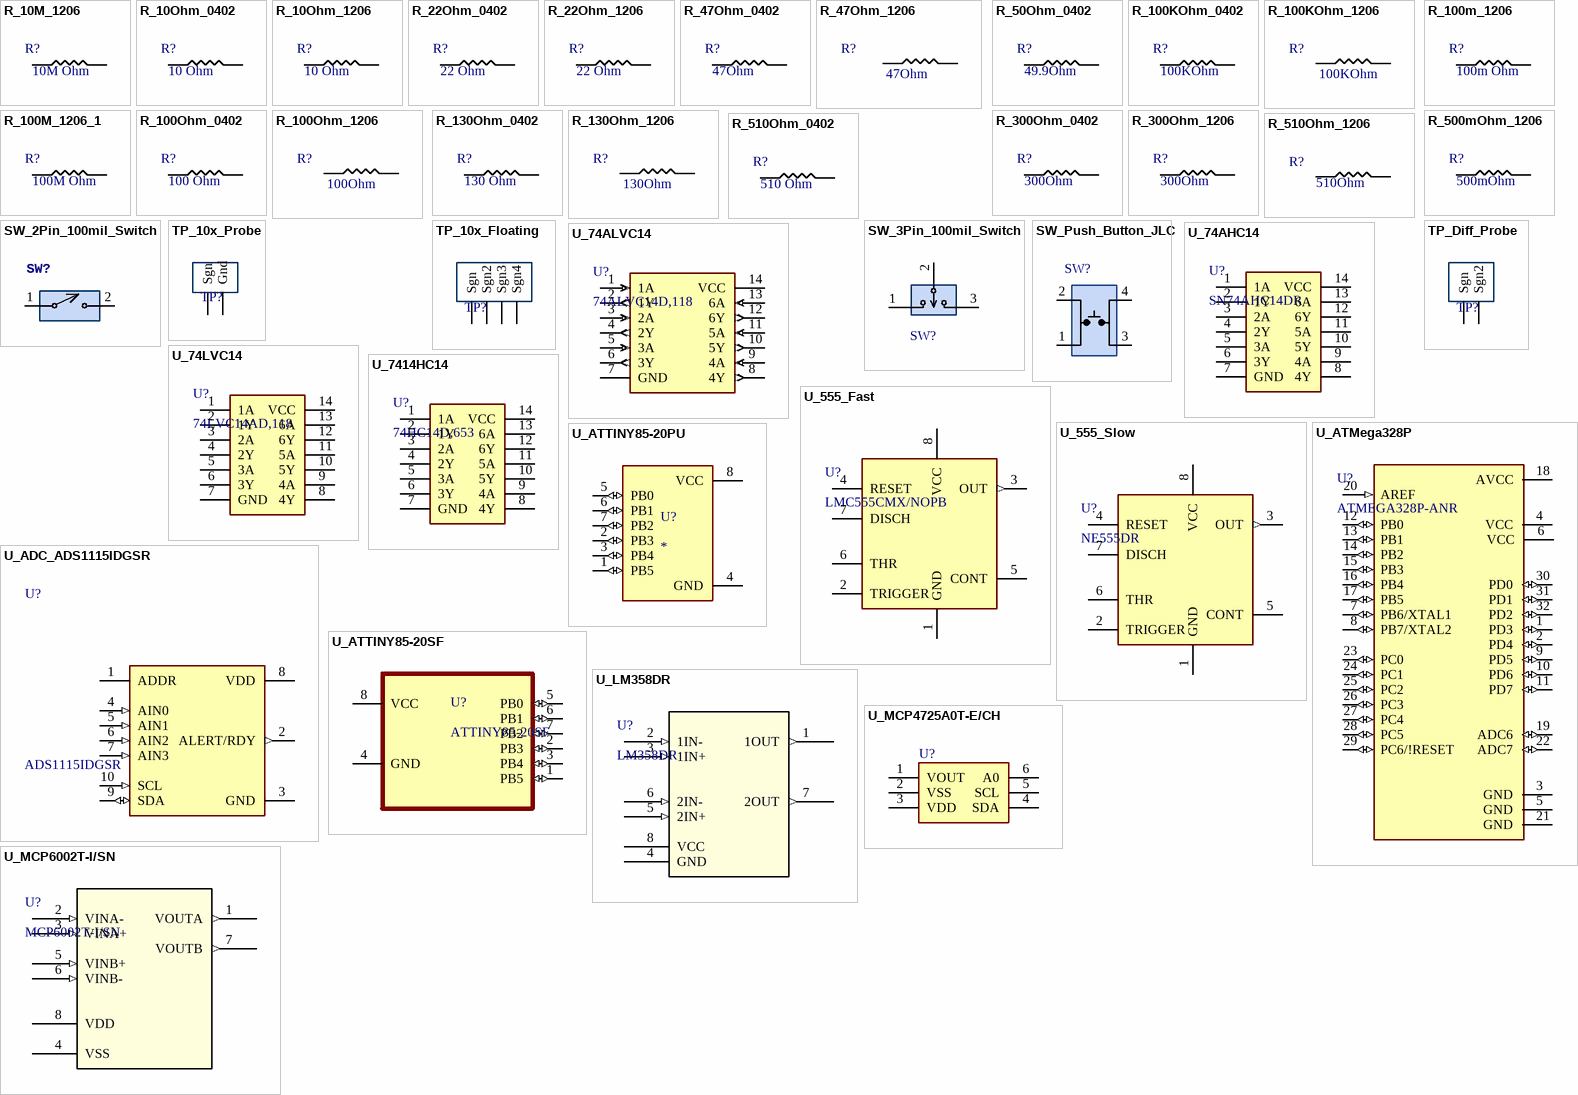
[diagram p2: symbols R_10M_1206 to U_MCP6002T-I/SN]

## R_10M_1206
designator R?, comment value 10M Ohm  (hidden comment: 10M)
CHIP RESISTOR - SURFACE MOUNT 10MOHMS ±1% 1/4W 1206 ROHS; MFR Part #: 1206W4F1005T5E; Digikey Link: https://www.digikey.com/en/products/detail/stackpole-electronics-inc/RMCF1206JT10M0/1757578; LCSC Part#: C26119; Type: Extended part
footprint 1206_Passive_Resitor
pins: 1, 2

## R_10Ohm_0402
designator R?, comment 10 Ohm
CHIP RESISTOR - SURFACE MOUNT 10OHMS ±1% 1/16W 0402 ROHS; MFR Part #: 0402WGF100JTCE; Datasheet: https://datasheet.lcsc.com/szlcsc/Uniroyal-Elec-0402WGF100JTCE_C25077.pdf; LCSC Part#: C25077; Type: Basic; Value: 10 Ohm
footprint 0402_Passive_Resistor (Reference: https://www.worthingtonassembly.com/perfect-0402-footprint)
pins: 1, 2

## R_10Ohm_1206
designator R?, comment 10 Ohm
CHIP RESISTOR - SURFACE MOUNT 0.1OHMS ±1% 1/4W 1206 ROHS; MFR Part #: 1206W4F100JT5E; Datasheet: https://datasheet.lcsc.com/szlcsc/Uniroyal-Elec-1206W4F100JT5E_C17903.pdf; LCSC Part#: C17903; Type: Basic; Value: 10 Ohm
footprint 1206_Passive_Resitor
pins: 1, 2

## R_22Ohm_0402
designator R?, comment value 22 Ohm  (hidden comment: 22Ohm)
CHIP RESISTOR - SURFACE MOUNT 22OHMS ±1% 1/16W 0402 ROHS; MFR Part #: 0402WGF220JTCE; Datasheet: https://datasheet.lcsc.com/szlcsc/Uniroyal-Elec-0402WGF220JTCE_C25092.pdf; LCSC Part#: C25092; Type: Basic
footprint 0402_Passive_Resistor (Reference: https://www.worthingtonassembly.com/perfect-0402-footprint)
pins: 1, 2

## R_22Ohm_1206
designator R?, comment value 22 Ohm  (hidden comment: 22Ohm)
CHIP RESISTOR - SURFACE MOUNT 22OHMS ±1% 1/4W 1206 ROHS; MFR Part #: 1206W4F220JT5E; Type: Basic; LCSC Part#: C17958
footprint 1206_Passive_Resitor
pins: 1, 2

## R_47Ohm_0402
designator R?, comment value 47Ohm  (hidden comment: 47 Ohms)
CHIP RESISTOR - SURFACE MOUNT 47OHMS ±1% 1/16W 0402 ROHS; MFR Part #: 0402WGF470JTCE; Datasheet: https://datasheet.lcsc.com/szlcsc/Uniroyal-Elec-0402WGF470JTCE_C25118.pdf; LCSC Part#: C25118; Type: Basic
footprint 0402_Passive_Resistor (Reference: https://www.worthingtonassembly.com/perfect-0402-footprint)
pins: 1, 2

## R_47Ohm_1206
designator R?, comment value 47Ohm  (hidden comment: 47 Ohms)
47Ω ±5% 0.25W ±200ppm/℃ 1206 Chip Resistor - Surface Mount RoHS; MFR Part #: 1206W4J0470T5E; LCSC Part#: C25384; Type: Extended; Datasheet: https://datasheet.lcsc.com/lcsc/1811101020_UNI-ROYAL-Uniroyal-Elec-1206W4J0470T5E_C25384.pdf
footprint 1206_Passive_Resitor
pins: 1, 2

## R_50Ohm_0402
designator R?, comment value 49.9Ohm  (hidden comment: 50 Ohms)
CHIP RESISTOR - SURFACE MOUNT 49.9OHMS ±1% 1/16W 0402 ROHS; MFR Part #: 0402WGF499JTCE; Datasheet: https://datasheet.lcsc.com/szlcsc/Uniroyal-Elec-0402WGF499JTCE_C25120.pdf; LCSC Part#: C25120; Type: Basic
footprint 0402_Passive_Resistor (Reference: https://www.worthingtonassembly.com/perfect-0402-footprint)
pins: 1, 2

## R_100KOhm_0402
designator R?, comment value 100KOhm  (hidden comment: 10k)
CHIP RESISTOR - SURFACE MOUNT 100KOHMS ±1% 1/16W 0402 ROHS; LCSC Part#: C25741; Type: Basic
footprint 0402_Passive_Resistor (Reference: https://www.worthingtonassembly.com/perfect-0402-footprint)
pins: 1, 2

## R_100KOhm_1206
designator R?, comment 100KOhm
100kΩ ±1% 0.25W ±100ppm/℃ 1206 Chip Resistor - Surface Mount RoHS; MFR Part #: 1206W4F1003T5E; LCSC Part#: C17900; Datasheet: https://datasheet.lcsc.com/lcsc/1810301421_UNI-ROYAL-Uniroyal-Elec-1206W4F1003T5E_C17900.pdf; Type: Basic; Value: 100KOhm
footprint 1206_Passive_Resitor
pins: 1, 2

## R_100m_1206
designator R?, comment value 100m Ohm  (hidden comment: 100m)
CHIP RESISTOR - SURFACE MOUNT 0.1OHMS ±1% 1/4W 1206 ROHS; MFR Part #: RNCP1206FTD1K00; Digikey Link: https://www.digikey.com/product-detail/en/RNCP1206FTD1K00/RNCP1206FTD1K00CT-ND/2240675/?itemSeq=304982373; LCSC Part#: C25334; Type: Basic
footprint 1206_Passive_Resitor
pins: 1, 2

## R_100M_1206_1
designator R?, comment value 100M Ohm  (hidden comment: 100M)
CHIP RESISTOR - SURFACE MOUNT 100MOHMS ±1% 1/4W 1206 ROHS; MFR Part #: 1206W4F1006T5E; Digikey Link: https://www.digikey.com/en/products/detail/stackpole-electronics-inc/HMC1206JT100M/1742855; LCSC Part#: C59781; Type: Extended part
footprint 1206_Passive_Resitor
pins: 1, 2

## R_100Ohm_0402
designator R?, comment value 100 Ohm  (hidden comment: 100)
CHIP RESISTOR - SURFACE MOUNT 100OHMS ±1% 1/16W 0402 ROHS; MFR Part #: 0402WGF1000TCE; Datasheet: https://datasheet.lcsc.com/lcsc/2205311900_UNI-ROYAL-Uniroyal-Elec-0402WGF1000TCE_C25076.pdf; LCSC Part#: C25076; Type: Basic
footprint 0402_Passive_Resistor (Reference: https://www.worthingtonassembly.com/perfect-0402-footprint)
pins: 1, 2

## R_100Ohm_1206
designator R?, comment 100Ohm
100Ω ±1% 0.25W ±100ppm/℃ 1206 Chip Resistor - Surface Mount RoHS; MFR Part #: 1206W4F1000T5E; LCSC Part#: C17901; Datasheet: https://datasheet.lcsc.com/lcsc/2206010145_UNI-ROYAL-Uniroyal-Elec-1206W4F1000T5E_C17901.pdf; Type: Basic; Value: 100Ohm
footprint 1206_Passive_Resitor
pins: 1, 2

## R_130Ohm_0402
designator R?, comment value 130 Ohm  (hidden comment: 130)
Chip Resistor - 1/16W Thick Film Resistors 50V ±1% ±100ppm/℃ -55℃~+155℃ 130Ω 0402  Surface Mount ROHS; MFR Part #: RC0402FR-07130RL; Datasheet: https://datasheet.lcsc.com/lcsc/2007151113_YAGEO-RC0402FR-07130RL_C477610.pdf; LCSC Part#: C477610; Type: Extended
footprint 0402_Passive_Resistor (Reference: https://www.worthingtonassembly.com/perfect-0402-footprint)
pins: 1, 2

## R_130Ohm_1206
designator R?, comment 130Ohm
Chip Resistor - 1/4W Thick Film Resistors 200V ±1% ±100ppm/℃ -55℃~+155℃ 130Ω 1206  Surface Mount ROHS; MFR Part #: ARG06FTC1300; LCSC Part#: C309090; Datasheet: https://datasheet.lcsc.com/lcsc/1810251714_Viking-Tech-ARG06FTC1300_C309090.pdf; Type: Extended; Value: 130Ohm
footprint 1206_Passive_Resitor
pins: 1, 2

## R_300Ohm_0402
designator R?, comment value 300Ohm  (hidden comment: 300 Ohm)
CHIP RESISTOR - SURFACE MOUNT 300OHMS ±1% 1/16W 0402 ROHS; MFR Part #: 0402WGF3000TCE; Datasheet: https://datasheet.lcsc.com/szlcsc/Uniroyal-Elec-0402WGF3000TCE_C25102.pdf; LCSC Part#: C25102; Type: Basic
footprint 0402_Passive_Resistor (Reference: https://www.worthingtonassembly.com/perfect-0402-footprint)
pins: 1, 2

## R_300Ohm_1206
designator R?, comment value 300Ohm  (hidden comment: 300 Ohm)
CHIP RESISTOR - SURFACE MOUNT 300OHMS ±1% 1/4W 1206 ROHS; MFR Part #: 1206W4F3000T5E; Datasheet: https://datasheet.lcsc.com/szlcsc/Uniroyal-Elec-1206W4F3000T5E_C17887.pdf; LCSC Part#: C17887; Type: Basic
footprint 1206_Passive_Resitor
pins: 1, 2

## R_500mOhm_1206
designator R?, comment value 500mOhm  (hidden comment: 500m)
Resistors/Shunt 250mW 500mΩ ±800ppm/℃ ±5% 1206  Current Sense  Resistors ROHS; MFR Part #: 1206W4J050KT5E; Datasheet: https://datasheet.lcsc.com/lcsc/1810301438_UNI-ROYAL-Uniroyal-Elec-1206W4J050KT5E_C247433.pdf; LCSC Part#: C247433; Type: Extended
footprint 1206_Passive_Resitor
pins: 1, 2

## R_510Ohm_0402
designator R?, comment value 510 Ohm  (hidden comment: 510Ohm)
CHIP RESISTOR - SURFACE MOUNT 510OHMS ±1% 1/16W 0402 ROHS; MFR Part #: 0402WGF5100TCE; Datasheet: https://datasheet.lcsc.com/szlcsc/Uniroyal-Elec-0402WGF5100TCE_C25123.pdf; LCSC Part#: C25123; Type: Basic
footprint 0402_Passive_Resistor (Reference: https://www.worthingtonassembly.com/perfect-0402-footprint)
pins: 1, 2

## R_510Ohm_1206
designator R?, comment 510Ohm
510Ω ±5% 0.25W ±100ppm/℃ 1206 Chip Resistor - Surface Mount RoHS; MFR Part #: 1206W4J0511T5E; LCSC Part#: C25386; Type: Extended; Datasheet: https://datasheet.lcsc.com/lcsc/1810301437_UNI-ROYAL-Uniroyal-Elec-1206W4J0511T5E_C25386.pdf; Value: 510Ohm
footprint 1206_Passive_Resitor
pins: 1, 2

## SW_2Pin_100mil_Switch
designator SW?
2Pin Header; LCSC Part#: C124375; Type: Extended
footprint 2Pin-Header-Conn
pins: 1, 2

## SW_3Pin_100mil_Switch
designator SW?, comment PREC003SAAN-RC  (value not drawn)
Connector Header Through Hole 3 position 0.100" (2.54mm); Value: CONN HEADER VERT 3POS 2.54MM; Digikey Link: https://www.digikey.com/product-detail/en/PREC003SAAN-RC/S1012EC-03-ND/2774851/?itemSeq=304982371; MFR Part #: PREC003SAAN-RC; Type: Extended; LCSC Part#: C49257
footprint 3_PIN_100mil
pins: 1, 2, 3

## SW_Push_Button_JLC
designator SW?, comment TL3305AF160QG  (value not drawn)
Tactile Switch SPST-NO Top Actuated Surface Mount; MFR Part #: KH-4.5X4.5X4.3H-STM; LCSC Part#: C2837550; Type: Extended; DataSheet: https://datasheet.lcsc.com/lcsc/2106081532_Shenzhen-Kinghelm-Elec-KH-4.5X4.5X4.3H-STM_C2837550.pdf
footprint Switch_JLC
pins: 1, 2, 3, 4

## TP_10x_Floating
designator TP?, comment 10x Probe Floating TP  (value not drawn)
Test Point 300 mil centers
footprint TP10x_Floating (Small Probs footprint)
pins: 1 Sgn, 2 Sgn2, 3 Sgn3, 4 Sgn4

## TP_10x_Probe
designator TP?, comment 10x Probe TP  (value not drawn)
Test Point 300 mil centers
footprint TP10x_Probe (Small Probs footprint)
pins: 1 Sgn, 2 Gnd

## TP_Diff_Probe
designator TP?, comment 10x Probe TP  (value not drawn)
Test Point 300 mil centers
footprint TP_Diff_Probe
pins: 1 Sgn, 2 Sgn2

## U_74AHC14
designator U?, comment SN74AHC14DR
Inverter IC 6 Channel Schmitt Trigger 14-SOIC; Datasheet: https://datasheet.lcsc.com/szlcsc/ON-Semicon-ON-74AC14SCX_C5482.pdf; MFR Part #: SN74AHC14DR; LCSC Part#: C6942; Type: Extended
footprint HEX_74AC14
pins: 1 1A, 2 1Y, 3 2A, 4 2Y, 5 3A, 6 3Y, 7 GND, 8 4Y, 9 4A, 10 5Y, 11 5A, 12 6Y, 13 6A, 14 VCC

## U_74ALVC14
designator U?, comment 74ALVC14D,118
Inverter IC 6 Channel Schmitt Trigger 14-SOIC; LCSC Part#: C554763; MFR Part #: 74ALVC14D,118; Type: Extended; DataSheet: https://datasheet.lcsc.com/lcsc/2006102112_Nexperia-74ALVC14D-118_C554763.pdf
footprint HEX_74AC14
pins: 1 1A (in), 2 1Y (out), 3 2A (in), 4 2Y (out), 5 3A (in), 6 3Y (out), 7 GND (power), 8 4Y (out), 9 4A (in), 10 5Y (out), 11 5A (in), 12 6Y (out), 13 6A (in), 14 VCC (power)

## U_74LVC14
designator U?, comment 74LVC14AD,118
IC INV SCHMITT 6CH 1-IN 14SOIC; Datasheet: https://datasheet.lcsc.com/lcsc/1809192010_Nexperia-74LVC14AD-118_C6065.pdf; MFR Part #: 74LVC14AD,118; LCSC Part#: C6065; Type: Extended
footprint HEX_74AC14
pins: 1 1A, 2 1Y, 3 2A, 4 2Y, 5 3A, 6 3Y, 7 GND, 8 4Y, 9 4A, 10 5Y, 11 5A, 12 6Y, 13 6A, 14 VCC

## U_555_Fast
designator U?, comment LMC555CMX/NOPB
555 Type, Timer/Oscillator _Single_ IC 3MHz 8-SO; Package: SOIC-8; MFR Part #: LMC555CMX/NOPB; DigiKey link: https://www.digikey.com/product-detail/en/texas-instruments/LMC555CMX-NOPB/LMC555CMX-NOPBCT-ND/1010550; LCSC Part#: C90760; Type: Extended
footprint TS555IDTTR (IC OSC Single Timer 2.7MHz 8SOIC)
pins: 1 GND (power), 2 TRIGGER, 3 OUT (out), 4 RESET, 5 CONT, 6 THR, 7 DISCH, 8 VCC (power)

## U_555_Slow
designator U?, comment NE555DR
555 Timer SOIC-8_150MIL ROHS 150ns Rise Time; MFR Part #: NE555DR; Digikey Link: https://www.digikey.com/product-detail/en/texas-instruments/NE555DR/296-6501-1-ND/372490; Type: Basic; LCSC Part#: C7593
footprint TS555IDTTR (IC OSC Single Timer 2.7MHz 8SOIC)
pins: 1 GND (power), 2 TRIGGER, 3 OUT (out), 4 RESET, 5 CONT, 6 THR, 7 DISCH, 8 VCC (power)

## U_7414HC14
designator U?, comment 74HC14D,653
IC INVERT SCHMITT 6CH 1-INP 14SO; Datasheet: https://datasheet.lcsc.com/lcsc/1811141851_Nexperia-74HC14D-653_C5605.pdf; MFR Part #: 74HC14D,653; LCSC Part#: C5605; Type: Basic
footprint HEX_74AC14
pins: 1 1A, 2 1Y, 3 2A, 4 2Y, 5 3A, 6 3Y, 7 GND, 8 4Y, 9 4A, 10 5Y, 11 5A, 12 6Y, 13 6A, 14 VCC

## U_ADC_ADS1115IDGSR
designator U?, comment ADS1115IDGSR
16-Bit ADC with Integrated MUX, PGA, Comparator, Oscillator, and Reference 10-VSSOP -40 to 125; MFR Part #: ADS1115IDGSR; Package: MSOP-10 Texas Instruments; LCSC Part#: C37593; SnapEDA_Link: https://www.snapeda.com/parts/ADS1115IDGSR/Texas%20Instruments/view-part/?ref=snap; Type: Extended; DigiKey link: https://www.digikey.com/product-detail/en/texas-instruments/ADS1115IDGSR/296-38849-1-ND/5142969?utm_source=snapeda&utm_medium=aggregator&utm_campaign=symbol; Value: *
footprint ADC_ADS1115IDGSR (*SOP50P490X110-10N)
pins: 1 ADDR, 2 ALERT/RDY (out), 3 GND (power), 4 AIN0 (in), 5 AIN1 (in), 6 AIN2 (in), 7 AIN3 (in), 8 VDD (power), 9 SDA (io), 10 SCL (in)

## U_ATMega328P
designator U?, comment ATMEGA328P-ANR
AVR AVR® ATmega Microcontroller IC 8-Bit 20MHz 32KB (16K x 16) FLASH 32-TQFP (7x7); MFR Part #: ATMEGA328P-AU; Value: IC MCU 8BIT 32KB FLASH 32TQFP; Digikey Link: https://www.digikey.com/product-detail/en/ATMEGA328P-ANR/ATMEGA328P-ANRCT-ND/2774230/?itemSeq=304982365; LCSC Part#: C14877; Type: Basic
footprint ATMega328P
pins: 1 PD3 (io), 2 PD4 (io), 3 GND (power), 4 VCC (power), 5 GND (power), 6 VCC (power), 7 PB6/XTAL1 (io), 8 PB7/XTAL2 (io), 9 PD5 (io), 10 PD6 (io), 11 PD7 (io), 12 PB0 (io), 13 PB1 (io), 14 PB2 (io), 15 PB3 (io), 16 PB4 (io), 17 PB5 (io), 18 AVCC (power), 19 ADC6 (io), 20 AREF (in), 21 GND (power), 22 ADC7 (io), 23 PC0 (io), 24 PC1 (io), 25 PC2 (io), 26 PC3 (io), 27 PC4 (io), 28 PC5 (io), 29 PC6/!RESET (io), 30 PD0 (io), 31 PD1 (io), 32 PD2 (io)

## U_ATTINY85-20PU
designator U?
AVR AVRÂ® ATtiny, Functional Safety (FuSa) Microcontroller IC 8-Bit 20MHz 8KB (4K x 16) FLASH 8-PDIP; MP: ATTINY85-20PU; MF: Microchip; Package: DIP-8 Atmel; Check_prices: https://www.snapeda.com/parts/ATTINY85-20PU/Microchip/view-part/42827/?ref=eda; Datasheet: https://ww1.microchip.com/downloads/en/DeviceDoc/Atmel-2586-AVR-8-bit-Microcontroller-ATtiny25-ATtiny45-ATtiny85_Datasheet.pdf; Datasheet summery: http://ww1.microchip.com/downloads/en/devicedoc/atmel-2586-avr-8-bit-microcontroller-attiny25-attiny45-attiny85_datasheet-summary.pdf
footprint DIP762W46P254L927H533Q8B
pins: 1 PB5 (io), 2 PB3 (io), 3 PB4 (io), 4 GND (power), 5 PB0 (io), 6 PB1 (io), 7 PB2 (io), 8 VCC (power)

## U_ATTINY85-20SF
designator U?, comment ATTINY85-20SF
AVR AVRÂ® ATtiny Microcontroller IC 8-Bit 20MHz 8KB _4K x 16_ FLASH 8-SOIC; MFR: Microchip; Datasheet: https://datasheet.lcsc.com/lcsc/2203221830_Microchip-Tech-ATTINY85-20SF_C615549.pdf; MFR Part #: ATTINY85-20SF; Package: SO-8 Microchip; LCSC Part#: C615549
footprint SOIC127P798X216-8N
pins: 1 PB5 (io), 2 PB3 (io), 3 PB4 (io), 4 GND, 5 PB0 (io), 6 PB1 (io), 7 PB2 (io), 8 VCC (power)

## U_LM358DR
designator U?, comment LM358DR
0.3 V/us 2 700kHz 3V ~ 32V, ±1.5V ~ 16V 1mA General Purpose SOIC-8_150mil  Operational Amplifier ROHS; MFR: Texas Instruments; MFR PART #: LM358DR; Digi-Link: https://www.digikey.com/en/products/detail/texas-instruments/LM358DR/276658; DataSheet: https://www.ti.com/lit/ds/symlink/lm358.pdf?HQS=dis-dk-null-digikeymode-dsf-pf-null-wwe&ts=1673352881039&ref_url=https%253A%252F%252Fwww.ti.com%252Fgeneral%252Fdocs%252Fsuppproductinfo.tsp%253FdistId%253D10%2526gotoUrl%253Dhttps%253A%252F%252Fwww.ti.com%252Flit%252Fgpn%252Flm358; LCSC PART#: C5423; Type: Extended
footprint D8
pins: 1 1OUT (out), 2 1IN- (in), 3 1IN+ (in), 4 GND (power), 5 2IN+ (in), 6 2IN- (in), 7 2OUT (out), 8 VCC (power)

## U_MCP4725A0T-E/CH
designator U?, comment DAC IC  (value not drawn)
IC DAC 12BIT V-OUT SOT23-6; MFR Part #: MCP4725A0T-E/CH; Datasheet: https://ww1.microchip.com/downloads/en/DeviceDoc/22039d.pdf; LCSC Part#: C144198; type: Extended
footprint MCP4725
pins: 1 VOUT, 2 VSS, 3 VDD, 4 SDA, 5 SCL, 6 A0

## U_MCP6002T-I/SN
designator U?, comment MCP6002T-I/SN
0.6 V/us 2 1MHz 1.8V ~ 6V 100μA General Purpose SOIC-8_150mil  Operational Amplifier ROHS; Mfr: Microchip; MFR Part #: MCP6002T-I/SN; DataSheet: https://ww1.microchip.com/downloads/en/DeviceDoc/MCP6001-1R-1U-2-4-1-MHz-Low-Power-Op-Amp-DS20001733L.pdf; LCSC Part#: C7377; Type: Basic
footprint SOIC127P600X175-8N (SOIC, 8-Leads, Body 4.90x3.90mm, Pitch 1.27mm, IPC Medium Density)
pins: 1 VOUTA (out), 2 VINA- (in), 3 VINA+ (in), 4 VSS, 5 VINB+ (in), 6 VINB- (in), 7 VOUTB (out), 8 VDD

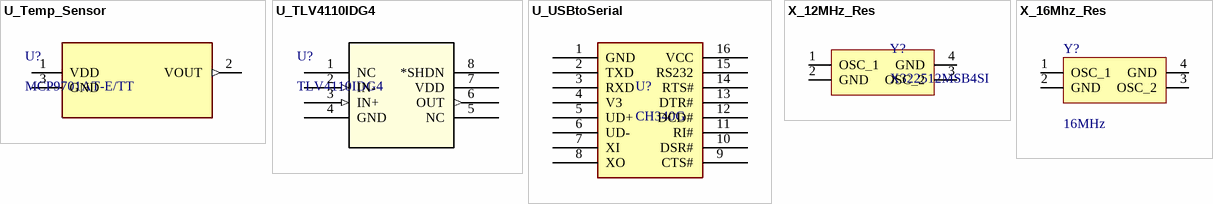
[diagram p3: symbols U_Temp_Sensor to X_16Mhz_Res]

## U_Temp_Sensor
designator U?, comment MCP9701AT-E/TT
19.5mV /°C TEMPERATURE SENSOR SOT-23(SOT-23-3) ROHS; MFR: Microchip; Price: None; Package: SOT-23-3 Microchip; LCSC Part#: C150830; MFR Part #: MCP9701AT-E/TT; SnapEDA_Link: https://www.snapeda.com/parts/MCP9701AT-E/TT/Microchip/view-part/425043/?ref=snap; Type: Extended
footprint Temp_Sensor_SOT95P237X112-3N
pins: 1 VDD (power), 2 VOUT (out), 3 GND

## U_TLV4110IDG4
designator U?, comment TLV4110IDG4
SOIC-8  Operational Amplifier ROHS; Mfr_Name: Texas Instruments; MFR PART #: TLV4110IDG4; RefDes: RefDes; Type: EXTENDED; LCSC PART#: C1348376
footprint D8
pins: 1 NC, 2 IN- (in), 3 IN+ (in), 4 GND (power), 5 NC, 6 OUT (out), 7 VDD (power), 8 *SHDN

## U_USBtoSerial
designator U?, comment CH340G
Transceiver USB 2.0 2Mbps SOP-16_150mil USB ICs RoHS; Value: USB to Serial; Datasheet: https://datasheet.lcsc.com/lcsc/2008191806_WCH-Jiangsu-Qin-Heng-CH340G_C14267.pdf; LCSC Part#: C14267; MFR Part #: CH340G; Type: Basic
footprint USB to serial
pins: 1 GND, 2 TXD, 3 RXD, 4 V3, 5 UD+, 6 UD-, 7 XI, 8 XO, 9 CTS#, 10 DSR#, 11 RI#, 12 DCD#, 13 DTR#, 14 RTS#, 15 RS232, 16 VCC

## X_12MHz_Res
designator Y?, comment X322512MSB4SI
SMD Crystal Resonators 12MHz ±10ppm SMD-3225_4P RoHS; LCSC Part#: C9002; MFR Part #: X322512MSB4SI; Value: 12MHz; Type: Basic; Datasheet: https://datasheet.lcsc.com/szlcsc/Yangxing-Tech-X322512MSB4SI_C9002.pdf
footprint Crystal resonator
pins: 1 OSC_1, 2 GND, 3 OSC_2, 4 GND

## X_16Mhz_Res
designator Y?, comment value 16MHz  (hidden comment: X322516MLB4SI)
±10ppm 16000000Hz -40℃~85℃ 贴片无源晶振 60Ω 9pF SMD3225-4P Crystals ROHS; LCSC Part#: C13738; MFR Part #: X322516MLB4SI; Type: Basic
footprint Crystal resonator
pins: 1 OSC_1, 2 GND, 3 OSC_2, 4 GND